# Altium footprint library Module.PcbLib: 20 footprints (part 1 of 2)
Each footprint in its own frame and in the unit in brackets; x right, y up, seen from the top. Pads: shape width x height; smd on the part's side, far side on the other; paste and mask are expansions set on the pad; w line width, h text height; cw(c..) or ccw(c..) is an arc to the next point about the centre after c.
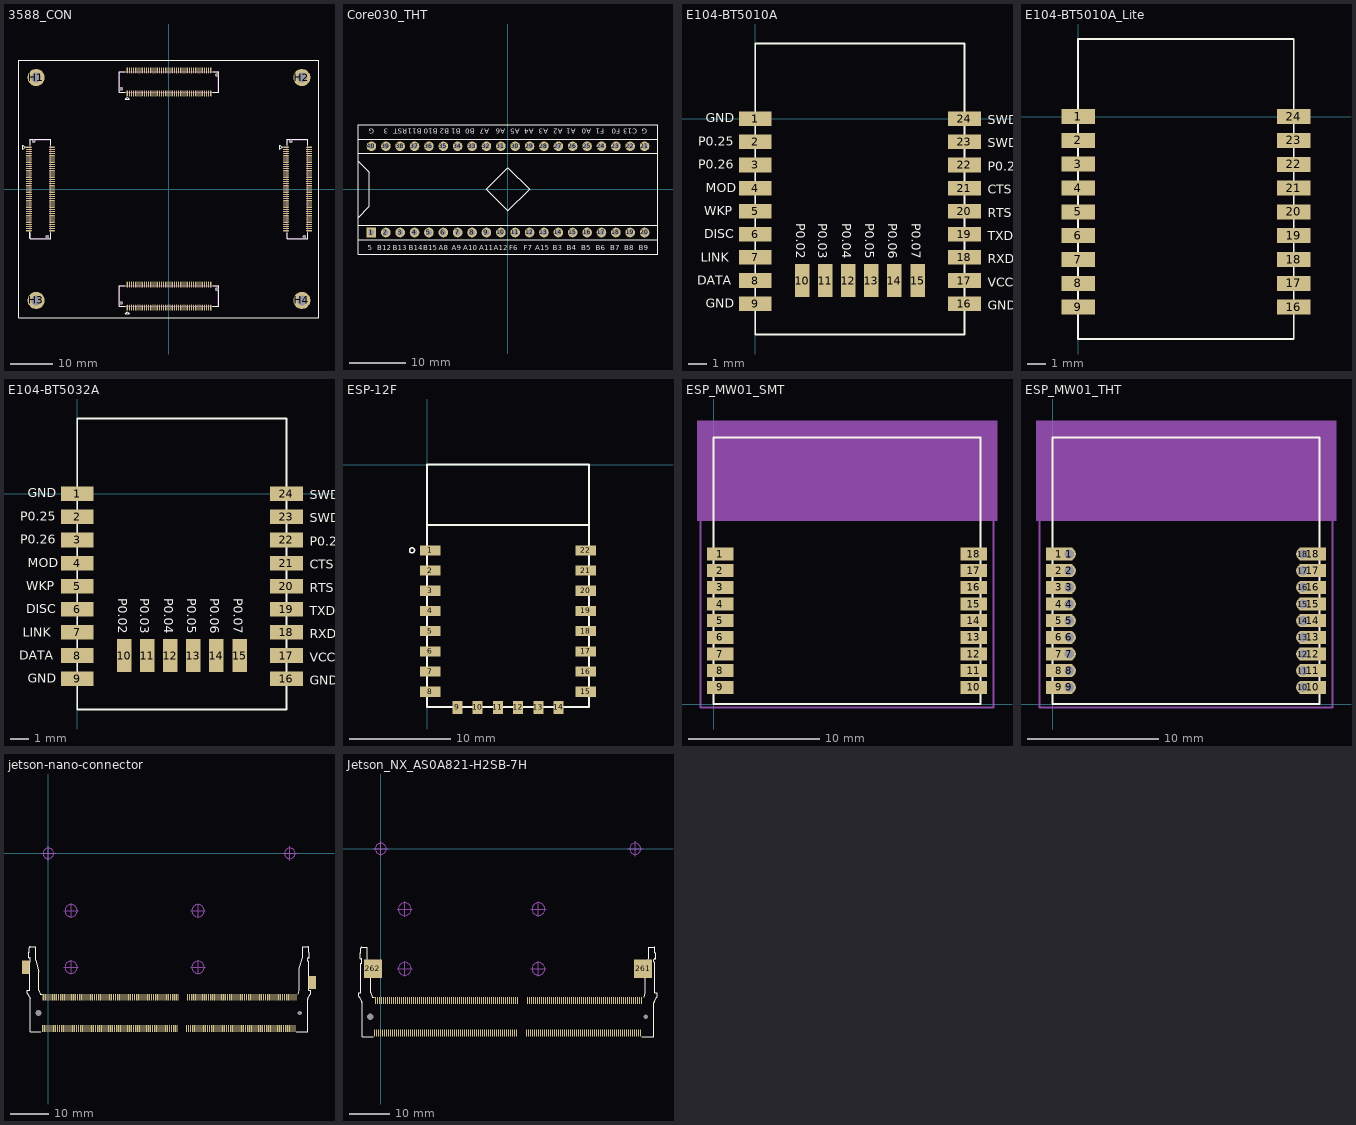
[diagram p0: the footprints below, top view; thin cyan lines are the x and y axes]

## 3588_CON [mil] "3588_CON"
pads (332):
  oval 10x55 smd: D1(-383.86,-1090.55) D2(-383.86,-877.95) D3(-364.17,-1090.55) D4(-364.17,-877.95) D5(-344.49,-1090.55) D6(-344.49,-877.95) D7(-324.8,-1090.55) D8(-324.8,-877.95) D9(-305.12,-1090.55) D10(-305.12,-877.95) D11(-285.43,-1090.55) D12(-285.43,-877.95) D13(-265.75,-1090.55) D14(-265.75,-877.95) D15(-246.06,-1090.55) D16(-246.06,-877.95) D17(-226.38,-1090.55) D18(-226.38,-877.95) D19(-206.69,-1090.55) D20(-206.69,-877.95) D21(-187.01,-1090.55) D22(-187.01,-877.95) D23(-167.32,-1090.55) D24(-167.32,-877.95) D25(-147.64,-1090.55) D26(-147.64,-877.95) D27(-127.95,-1090.55) D28(-127.95,-877.95) D29(-108.27,-1090.55) D30(-108.27,-877.95) D31(-88.58,-1090.55) D32(-88.58,-877.95) D33(-68.9,-1090.55) D34(-68.9,-877.95) D35(-49.21,-1090.55) D36(-49.21,-877.95) D37(-29.53,-1090.55) D38(-29.53,-877.95) D39(-9.84,-1090.55) D40(-9.84,-877.95) D41(9.84,-1090.55) D42(9.84,-877.95) D43(29.53,-1090.55) D44(29.53,-877.95) D45(49.21,-1090.55) D46(49.21,-877.95) D47(68.9,-1090.55) D48(68.9,-877.95) D49(88.58,-1090.55) D50(88.58,-877.95) D51(108.27,-1090.55) D52(108.27,-877.95) D53(127.95,-1090.55) D54(127.95,-877.95) D55(147.64,-1090.55) D56(147.64,-877.95) D57(167.32,-1090.55) D58(167.32,-877.95) D59(187.01,-1090.55) D60(187.01,-877.95) D61(206.69,-1090.55) D62(206.69,-877.95) D63(226.38,-1090.55) D64(226.38,-877.95) D65(246.06,-1090.55) D66(246.06,-877.95) D67(265.75,-1090.55) D68(265.75,-877.95) D69(285.43,-1090.55) D70(285.43,-877.95) D71(305.12,-1090.55) D72(305.12,-877.95) D73(324.8,-1090.55) D74(324.8,-877.95) D75(344.49,-1090.55) D76(344.49,-877.95) D77(364.17,-1090.55) D78(364.17,-877.95) D79(383.86,-1090.55) D80(383.86,-877.95) U1(-383.86,877.95) U2(-383.86,1090.55) U3(-364.17,877.95) U4(-364.17,1090.55) U5(-344.49,877.95) U6(-344.49,1090.55) U7(-324.8,877.95) U8(-324.8,1090.55) U9(-305.12,877.95) U10(-305.12,1090.55) U11(-285.43,877.95) U12(-285.43,1090.55) U13(-265.75,877.95) U14(-265.75,1090.55) U15(-246.06,877.95) U16(-246.06,1090.55) U17(-226.38,877.95) U18(-226.38,1090.55) U19(-206.69,877.95) U20(-206.69,1090.55) U21(-187.01,877.95) U22(-187.01,1090.55) U23(-167.32,877.95) U24(-167.32,1090.55) U25(-147.64,877.95) U26(-147.64,1090.55) U27(-127.95,877.95) U28(-127.95,1090.55) U29(-108.27,877.95) U30(-108.27,1090.55) U31(-88.58,877.95) U32(-88.58,1090.55) U33(-68.9,877.95) U34(-68.9,1090.55) U35(-49.21,877.95) U36(-49.21,1090.55) U37(-29.53,877.95) U38(-29.53,1090.55) U39(-9.84,877.95) U40(-9.84,1090.55) U41(9.84,877.95) U42(9.84,1090.55) U43(29.53,877.95) U44(29.53,1090.55) U45(49.21,877.95) U46(49.21,1090.55) U47(68.9,877.95) U48(68.9,1090.55) U49(88.58,877.95) U50(88.58,1090.55) U51(108.27,877.95) U52(108.27,1090.55) U53(127.95,877.95) U54(127.95,1090.55) U55(147.64,877.95) U56(147.64,1090.55) U57(167.32,877.95) U58(167.32,1090.55) U59(187.01,877.95) U60(187.01,1090.55) U61(206.69,877.95) U62(206.69,1090.55) U63(226.38,877.95) U64(226.38,1090.55) U65(246.06,877.95) U66(246.06,1090.55) U67(265.75,877.95) U68(265.75,1090.55) U69(285.43,877.95) U70(285.43,1090.55) U71(305.12,877.95) U72(305.12,1090.55) U73(324.8,877.95) U74(324.8,1090.55) U75(344.49,877.95) U76(344.49,1090.55) U77(364.17,877.95) U78(364.17,1090.55) U79(383.86,877.95) U80(383.86,1090.55)
  round 157.48 hole 90.55: H1(-1220.48,1023.62) H2(1220.48,1023.62) H3(-1220.48,-1023.62) H4(1220.48,-1023.62)
  oval 55x10 smd: L1(-1287.4,383.86) L2(-1074.8,383.86) L3(-1287.4,364.17) L4(-1074.8,364.17) L5(-1287.4,344.49) L6(-1074.8,344.49) L7(-1287.4,324.8) L8(-1074.8,324.8) L9(-1287.4,305.12) L10(-1074.8,305.12) L11(-1287.4,285.43) L12(-1074.8,285.43) L13(-1287.4,265.75) L14(-1074.8,265.75) L15(-1287.4,246.06) L16(-1074.8,246.06) L17(-1287.4,226.38) L18(-1074.8,226.38) L19(-1287.4,206.69) L20(-1074.8,206.69) L21(-1287.4,187.01) L22(-1074.8,187.01) L23(-1287.4,167.32) L24(-1074.8,167.32) L25(-1287.4,147.64) L26(-1074.8,147.64) L27(-1287.4,127.95) L28(-1074.8,127.95) L29(-1287.4,108.27) L30(-1074.8,108.27) L31(-1287.4,88.58) L32(-1074.8,88.58) L33(-1287.4,68.9) L34(-1074.8,68.9) L35(-1287.4,49.21) L36(-1074.8,49.21) L37(-1287.4,29.53) L38(-1074.8,29.53) L39(-1287.4,9.84) L40(-1074.8,9.84) L41(-1287.4,-9.84) L42(-1074.8,-9.84) L43(-1287.4,-29.53) L44(-1074.8,-29.53) L45(-1287.4,-49.21) L46(-1074.8,-49.21) L47(-1287.4,-68.9) L48(-1074.8,-68.9) L49(-1287.4,-88.58) L50(-1074.8,-88.58) L51(-1287.4,-108.27) L52(-1074.8,-108.27) L53(-1287.4,-127.95) L54(-1074.8,-127.95) L55(-1287.4,-147.64) L56(-1074.8,-147.64) L57(-1287.4,-167.32) L58(-1074.8,-167.32) L59(-1287.4,-187.01) L60(-1074.8,-187.01) L61(-1287.4,-206.69) L62(-1074.8,-206.69) L63(-1287.4,-226.38) L64(-1074.8,-226.38) L65(-1287.4,-246.06) L66(-1074.8,-246.06) L67(-1287.4,-265.75) L68(-1074.8,-265.75) L69(-1287.4,-285.43) L70(-1074.8,-285.43) L71(-1287.4,-305.12) L72(-1074.8,-305.12) L73(-1287.4,-324.8) L74(-1074.8,-324.8) L75(-1287.4,-344.49) L76(-1074.8,-344.49) L77(-1287.4,-364.17) L78(-1074.8,-364.17) L79(-1287.4,-383.86) L80(-1074.8,-383.86) R1(1074.8,383.86) R2(1287.4,383.86) R3(1074.8,364.17) R4(1287.4,364.17) R5(1074.8,344.49) R6(1287.4,344.49) R7(1074.8,324.8) R8(1287.4,324.8) R9(1074.8,305.12) R10(1287.4,305.12) R11(1074.8,285.43) R12(1287.4,285.43) R13(1074.8,265.75) R14(1287.4,265.75) R15(1074.8,246.06) R16(1287.4,246.06) R17(1074.8,226.38) R18(1287.4,226.38) R19(1074.8,206.69) R20(1287.4,206.69) R21(1074.8,187.01) R22(1287.4,187.01) R23(1074.8,167.32) R24(1287.4,167.32) R25(1074.8,147.64) R26(1287.4,147.64) R27(1074.8,127.95) R28(1287.4,127.95) R29(1074.8,108.27) R30(1287.4,108.27) R31(1074.8,88.58) R32(1287.4,88.58) R33(1074.8,68.9) R34(1287.4,68.9) R35(1074.8,49.21) R36(1287.4,49.21) R37(1074.8,29.53) R38(1287.4,29.53) R39(1074.8,9.84) R40(1287.4,9.84) R41(1074.8,-9.84) R42(1287.4,-9.84) R43(1074.8,-29.53) R44(1287.4,-29.53) R45(1074.8,-49.21) R46(1287.4,-49.21) R47(1074.8,-68.9) R48(1287.4,-68.9) R49(1074.8,-88.58) R50(1287.4,-88.58) R51(1074.8,-108.27) R52(1287.4,-108.27) R53(1074.8,-127.95) R54(1287.4,-127.95) R55(1074.8,-147.64) R56(1287.4,-147.64) R57(1074.8,-167.32) R58(1287.4,-167.32) R59(1074.8,-187.01) R60(1287.4,-187.01) R61(1074.8,-206.69) R62(1287.4,-206.69) R63(1074.8,-226.38) R64(1287.4,-226.38) R65(1074.8,-246.06) R66(1287.4,-246.06) R67(1074.8,-265.75) R68(1287.4,-265.75) R69(1074.8,-285.43) R70(1287.4,-285.43) R71(1074.8,-305.12) R72(1287.4,-305.12) R73(1074.8,-324.8) R74(1287.4,-324.8) R75(1074.8,-344.49) R76(1287.4,-344.49) R77(1074.8,-364.17) R78(1287.4,-364.17) R79(1074.8,-383.86) R80(1287.4,-383.86)
  round 32 hole 32 unplated: ""(-1244.09,437.01) ""(-1118.11,-437.01) ""(-437.01,-1047.24) ""(-437.01,921.26) ""(437.01,-921.26) ""(437.01,1047.24) ""(1118.11,437.01) ""(1244.1,-437.01)
Top Overlay:
  lines w6: -1278.34,-450 -1278.34,-395 ; -1276.1,-400 -1276.1,-455 -1086.1,-455 -1086.1,-400 ; -1276.1,400 -1276.1,455 -1086.1,455 -1086.1,400 ; -400,-1079.25 -455,-1079.25 -455,-889.25 -400,-889.25 ; -400,889.25 -455,889.25 -455,1079.25 -400,1079.25 ; 400,-1079.25 455,-1079.25 455,-889.25 400,-889.25 ; 400,889.25 455,889.25 455,1079.25 400,1079.25 ; 1086.1,-400 1086.1,-455 1276.1,-455 1276.1,-400 ; 1086.1,400 1086.1,455 1276.1,455 1276.1,400 ; -1377.95,-1181.1 1377.95,-1181.1 1377.95,1181.1 -1377.95,1181.1 -1377.95,-1181.1 ; -1342.57,363.61 -1342.57,403.61 -1322.57,383.61 -1342.57,363.61 ; -403.61,-1145.72 -383.61,-1125.72 -363.61,-1145.72 -403.61,-1145.72 ; -403.61,822.78 -383.61,842.78 -363.61,822.78 -403.61,822.78 ; 1019.63,363.61 1019.63,403.61 1039.63,383.61 1019.63,363.61
Mechanical 19:
  text "L29" at -1347.4,58.27 h25
  text "U29" at -118.27,877.95 h25
  text "L23" at -1347.4,117.32 h25
  text "L19" at -1347.4,156.69 h25
  text "L35" at -1347.4,-0.79 h25
  text "L21" at -1347.4,137.01 h25
  text "L25" at -1347.4,97.64 h25
  text "L37" at -1347.4,-20.47 h25
  text "L11" at -1347.4,235.43 h25
  text "L39" at -1347.4,-40.16 h25
  text "L9" at -1327.4,255.12 h25
  text "L33" at -1347.4,18.9 h25
  text "L7" at -1327.4,274.8 h25
  text "L5" at -1327.4,294.49 h25
  text "U73" at 314.8,877.95 h25
  text "R2" at 1247.4,333.86 h25
  text "L70" at -1134.8,-335.43 h25
  text "L74" at -1134.8,-374.8 h25
  text "U79" at 373.86,877.95 h25
  text "U27" at -137.95,877.95 h25
  text "L50" at -1134.8,-138.58 h25
  text "L48" at -1134.8,-118.9 h25
  text "D64" at 218.24,-879.7 h25
  text "D66" at 237.92,-879.7 h25
  text "D78" at 356.03,-879.7 h25
  text "U77" at 354.17,877.95 h25
  text "R71" at 1014.8,-355.12 h25
  text "R73" at 1014.8,-374.8 h25
  text "R65" at 1014.8,-296.06 h25
  text "R63" at 1014.8,-276.38 h25
  text "R61" at 1014.8,-256.69 h25
  text "R59" at 1014.8,-237.01 h25
  text "L72" at -1134.8,-355.12 h25
  text "U5" at -334.49,877.95 h25
  text "D38" at -37.67,-879.7 h25
  text "L14" at -1134.8,215.75 h25
  text "L2" at -1114.8,333.86 h25
  text "L4" at -1114.8,314.17 h25
  text "L34" at -1134.8,18.9 h25
  text "U6" at -334.49,1090.55 h25
  text "U18" at -236.38,1090.55 h25
  text "L40" at -1134.8,-40.16 h25
  text "U11" at -295.43,877.95 h25
  text "L38" at -1134.8,-20.47 h25
  text "U8" at -314.8,1090.55 h25
  text "U20" at -216.69,1090.55 h25
  text "L20" at -1134.8,156.69 h25
  text "L44" at -1134.8,-79.53 h25
  text "U9" at -295.12,877.95 h25
  text "L12" at -1134.8,235.43 h25
  text "U16" at -256.06,1090.55 h25
  text "U19" at -216.69,877.95 h25
  text "D68" at 257.61,-879.7 h25
  text "L26" at -1134.8,97.64 h25
  text "R76" at 1227.4,-394.49 h25
  text "L8" at -1114.8,274.8 h25
  text "R47" at 1014.8,-118.9 h25
  text "D48" at 60.76,-879.7 h25
  text "R9" at 1034.8,255.12 h25
  text "L28" at -1134.8,77.95 h25
  text "R43" at 1014.8,-79.53 h25
  text "L18" at -1134.8,176.38 h25
  text "L36" at -1134.8,-0.79 h25
  text "U1" at -373.86,877.95 h25
  text "U52" at 98.27,1090.55 h25
  text "R78" at 1227.4,-414.17 h25
  text "U62" at 196.69,1090.55 h25
  text "D22" at -195.15,-879.7 h25
  text "D24" at -175.46,-879.7 h25
  text "U15" at -256.06,877.95 h25
  text "U37" at -39.53,877.95 h25
  text "D20" at -214.83,-879.7 h25
  text "L80" at -1134.8,-433.86 h25
  text "U58" at 157.32,1090.55 h25
  text "D42" at 1.7,-879.7 h25
  text "L76" at -1134.8,-394.49 h25
  text "U66" at 236.06,1090.55 h25
  text "L22" at -1134.8,137.01 h25
  text "D26" at -155.78,-879.7 h25
  text "L3" at -1327.4,314.17 h25
  text "R49" at 1014.8,-138.58 h25
  text "R57" at 1014.8,-217.32 h25
  text "R77" at 1014.8,-414.17 h25
  text "R51" at 1014.8,-158.27 h25
  text "R11" at 1014.8,235.43 h25
  text "L15" at -1347.4,196.06 h25
  text "R55" at 1014.8,-197.64 h25
  text "U50" at 78.58,1090.55 h25
  text "L17" at -1347.4,176.38 h25
  text "R53" at 1014.8,-177.95 h25
  text "D72" at 296.98,-879.7 h25
  text "U60" at 177.01,1090.55 h25
  text "U3" at -354.17,877.95 h25
  text "U35" at -59.21,877.95 h25
  text "U56" at 137.64,1090.55 h25
  text "L6" at -1114.8,294.49 h25
  text "U72" at 295.12,1090.55 h25
  text "U14" at -275.75,1090.55 h25
  text "U10" at -315.12,1090.55 h25
  text "L32" at -1134.8,38.58 h25
  text "U78" at 354.17,1090.55 h25
  text "U71" at 295.12,877.95 h25
  text "U13" at -275.75,877.95 h25
  text "U63" at 216.38,877.95 h25
  text "R1" at 1034.8,333.86 h25
  text "U68" at 255.75,1090.55 h25
  text "D18" at -234.52,-879.7 h25
  text "U80" at 373.86,1090.55 h25
  text "L42" at -1134.8,-59.84 h25
  text "R32" at 1227.4,38.58 h25
  text "R69" at 1014.8,-335.43 h25
  text "U7" at -314.8,877.95 h25
  text "R13" at 1014.8,215.75 h25
  text "R79" at 1014.8,-433.86 h25
  text "L30" at -1134.8,58.27 h25
  text "U70" at 275.43,1090.55 h25
  text "U22" at -197.01,1090.55 h25
  text "R7" at 1034.8,274.8 h25
  text "L16" at -1134.8,196.06 h25
  text "U17" at -236.38,877.95 h25
  text "D28" at -136.09,-879.7 h25
  text "R67" at 1014.8,-315.75 h25
  text "D40" at -17.98,-879.7 h25
  text "R70" at 1227.4,-335.43 h25
  text "R72" at 1227.4,-355.12 h25
  text "D36" at -57.35,-879.7 h25
  text "L68" at -1134.8,-315.75 h25
  text "R44" at 1227.4,-79.53 h25
  text "R5" at 1034.8,294.49 h25
  text "R42" at 1227.4,-59.84 h25
  text "R46" at 1227.4,-99.21 h25
  text "R48" at 1227.4,-118.9 h25
  text "R34" at 1227.4,18.9 h25
  text "R58" at 1227.4,-217.32 h25
  text "R56" at 1227.4,-197.64 h25
  text "R62" at 1227.4,-256.69 h25
  text "R60" at 1227.4,-237.01 h25
  text "U4" at -354.17,1090.55 h25
  text "R54" at 1227.4,-177.95 h25
  text "R41" at 1014.8,-59.84 h25
  text "R52" at 1227.4,-158.27 h25
  text "D56" at 139.5,-879.7 h25
  text "R80" at 1227.4,-433.86 h25
  text "D58" at 159.18,-879.7 h25
  text "U76" at 334.49,1090.55 h25
  text "D61" at 174.94,-1104.76 h25
  text "D47" at 37.15,-1104.76 h25
  text "U67" at 255.75,877.95 h25
  text "D39" at -41.59,-1104.76 h25
  text "R38" at 1227.4,-20.47 h25
  text "R35" at 1014.8,-0.79 h25
  text "L66" at -1134.8,-296.06 h25
  text "D55" at 115.89,-1104.76 h25
  text "D49" at 56.83,-1104.76 h25
  text "D31" at -120.33,-1104.76 h25
  text "R4" at 1247.4,314.17 h25
  text "R33" at 1014.8,18.9 h25
  text "R31" at 1014.8,38.58 h25
  text "R3" at 1034.8,314.17 h25
  text "R19" at 1014.8,156.69 h25
  text "D19" at -238.44,-1104.76 h25
  text "D76" at 336.35,-879.7 h25
  text "D60" at 178.87,-879.7 h25
  text "U12" at -295.43,1090.55 h25
  text "D29" at -140.02,-1104.76 h25
  text "R17" at 1014.8,176.38 h25
  text "D52" at 100.13,-879.7 h25
  text "R23" at 1014.8,117.32 h25
  text "D74" at 316.66,-879.7 h25
  text "D35" at -80.96,-1104.76 h25
  text "R21" at 1014.8,137.01 h25
  text "D9" at -316.87,-1104.76 h25
  text "R27" at 1014.8,77.95 h25
  text "U69" at 275.43,877.95 h25
  text "D41" at -21.91,-1104.76 h25
  text "R6" at 1247.4,294.49 h25
  text "R25" at 1014.8,97.64 h25
  text "U75" at 334.49,877.95 h25
  text "D16" at -254.2,-879.7 h25
  text "D34" at -77.04,-879.7 h25
  text "D5" at -356.24,-1104.76 h25
  text "D15" at -277.81,-1104.76 h25
  text "D13" at -297.5,-1104.76 h25
  text "U74" at 314.8,1090.55 h25
  text "D21" at -218.76,-1104.76 h25
  text "R37" at 1014.8,-20.47 h25
  text "D4" at -374.17,-878.39 h25
  text "D27" at -159.7,-1104.76 h25
  text "R36" at 1227.4,-0.79 h25
  text "D43" at -2.22,-1104.76 h25
  text "D44" at 21.39,-879.7 h25
  text "D7" at -336.55,-1104.76 h25
  text "D14" at -273.89,-879.7 h25
  text "D59" at 155.26,-1104.76 h25
  text "D10" at -313.26,-879.7 h25
  text "D11" at -317.18,-1104.76 h25
  text "D8" at -336.11,-878.17 h25
  text "D33" at -100.65,-1104.76 h25
  text "D37" at -61.28,-1104.76 h25
  text "U48" at 58.9,1090.55 h25
  text "D25" at -179.39,-1104.76 h25
  text "D2" at -394.46,-878.61 h25
  text "R39" at 1014.8,-40.16 h25
  text "D12" at -293.57,-879.7 h25
  text "D3" at -375.92,-1104.76 h25
  text "R40" at 1227.4,-40.16 h25
  text "D17" at -258.13,-1104.76 h25
  text "D62" at 198.55,-879.7 h25
  text "L53" at -1347.4,-177.95 h25
  text "U25" at -157.64,877.95 h25
  text "U54" at 117.95,1090.55 h25
  text "R26" at 1227.4,97.64 h25
  text "U31" at -98.58,877.95 h25
  text "R22" at 1227.4,137.01 h25
  text "U33" at -78.9,877.95 h25
  text "R10" at 1227.4,255.12 h25
  text "R18" at 1227.4,176.38 h25
  text "R14" at 1227.4,215.75 h25
  text "R12" at 1227.4,235.43 h25
  text "R16" at 1227.4,196.06 h25
  text "L78" at -1134.8,-414.17 h25
  text "R24" at 1227.4,117.32 h25
  text "R28" at 1227.4,77.95 h25
  text "R20" at 1227.4,156.69 h25
  text "U43" at 19.53,877.95 h25
  text "U41" at -0.16,877.95 h25
  text "U47" at 58.9,877.95 h25
  text "U45" at 39.21,877.95 h25
  text "U57" at 157.32,877.95 h25
  text "L58" at -1134.8,-217.32 h25
  text "U55" at 137.64,877.95 h25
  text "L49" at -1347.4,-138.58 h25
  text "L56" at -1134.8,-197.64 h25
  text "U61" at 196.69,877.95 h25
  text "L51" at -1347.4,-158.27 h25
  text "D32" at -96.72,-879.7 h25
  text "L54" at -1134.8,-177.95 h25
  text "U59" at 177.01,877.95 h25
  text "L47" at -1347.4,-118.9 h25
  text "L52" at -1134.8,-158.27 h25
  text "U51" at 98.27,877.95 h25
  text "L55" at -1347.4,-197.64 h25
  text "U49" at 78.58,877.95 h25
  text "L61" at -1347.4,-256.69 h25
  text "U44" at 19.53,1090.55 h25
  text "L63" at -1347.4,-276.38 h25
  text "U42" at -0.16,1090.55 h25
  text "L69" at -1347.4,-335.43 h25
  text "U40" at -19.84,1090.55 h25
  text "L77" at -1347.4,-414.17 h25
  text "U38" at -39.53,1090.55 h25
  text "L79" at -1347.4,-433.86 h25
  text "U32" at -98.58,1090.55 h25
  text "L45" at -1347.4,-99.21 h25
  text "U30" at -118.27,1090.55 h25
  text "L71" at -1347.4,-355.12 h25
  text "U28" at -137.95,1090.55 h25
  text "L65" at -1347.4,-296.06 h25
  text "U26" at -157.64,1090.55 h25
  text "L73" at -1347.4,-374.8 h25
  text "U36" at -59.21,1090.55 h25
  text "L75" at -1347.4,-394.49 h25
  text "U23" at -177.32,877.95 h25
  text "U34" at -78.9,1090.55 h25
  text "L57" at -1347.4,-217.32 h25
  text "L59" at -1347.4,-237.01 h25
  text "D70" at 277.29,-879.7 h25
  text "D79" at 352.11,-1104.76 h25
  text "D77" at 332.42,-1104.76 h25
  text "D75" at 312.74,-1104.76 h25
  text "D73" at 293.05,-1104.76 h25
  text "D71" at 273.37,-1104.76 h25
  text "D53" at 96.2,-1104.76 h25
  text "D51" at 76.52,-1104.76 h25
  text "D57" at 135.57,-1104.76 h25
  text "L27" at -1347.4,77.95 h25
  text "R75" at 1014.8,-394.49 h25
  text "L41" at -1347.4,-59.84 h25
  text "D50" at 80.44,-879.7 h25
  text "L31" at -1347.4,38.58 h25
  text "L64" at -1134.8,-276.38 h25
  text "L62" at -1134.8,-256.69 h25
  text "R66" at 1227.4,-296.06 h25
  text "R68" at 1227.4,-315.75 h25
  text "D46" at 41.07,-879.7 h25
  text "R74" at 1227.4,-374.8 h25
  text "R29" at 1014.8,58.27 h25
  text "L10" at -1134.8,255.12 h25
  text "L43" at -1347.4,-79.53 h25
  text "U65" at 236.06,877.95 h25
  text "U64" at 216.38,1090.55 h25
  text "H4" at 1130.48,-1023.62 h25
  text "L60" at -1134.8,-237.01 h25
  text "H2" at 1130.48,1023.62 h25
  text "H1" at -1310.48,1023.62 h25
  text "L1" at -1327.4,333.86 h25
  text "L67" at -1347.4,-315.75 h25
  text "H3" at -1310.48,-1023.62 h25
  text "U46" at 39.21,1090.55 h25
  text "U24" at -177.32,1090.55 h25
  text "U2" at -373.86,1090.55 h25
  text "U53" at 117.95,877.95 h25
  text "U21" at -197.01,877.95 h25
  text "U39" at -19.84,877.95 h25
  text "R8" at 1247.4,274.8 h25
  text "R15" at 1014.8,196.06 h25
  text "R30" at 1227.4,58.27 h25
  text "L13" at -1347.4,215.75 h25
  text "L24" at -1134.8,117.32 h25
  text "R45" at 1014.8,-99.21 h25
  text "R50" at 1227.4,-138.58 h25
  text "R64" at 1227.4,-276.38 h25
  text "L46" at -1134.8,-99.21 h25
  text "D80" at 375.72,-879.7 h25
  text "D54" at 119.81,-879.7 h25
  text "D30" at -116.41,-879.7 h25
  text "D6" at -354.93,-878.39 h25
  text "D45" at 17.46,-1104.76 h25
  text "D63" at 194.63,-1104.76 h25
  text "D65" at 214.31,-1104.76 h25
  text "D67" at 234,-1104.76 h25
  text "D69" at 253.68,-1104.76 h25
  text "D23" at -199.07,-1104.76 h25
  text "D1" at -325.61,-1104.76 h25
Mechanical 20:
  lines w6: -1275.59,-452.76 -1086.61,-452.76 -1086.61,452.76 -1275.59,452.76 -1275.59,-452.76 ; -452.76,-1078.74 452.76,-1078.74 452.76,-889.76 -452.76,-889.76 -452.76,-1078.74 ; -452.76,889.76 452.76,889.76 452.76,1078.74 -452.76,1078.74 -452.76,889.76 ; 1086.62,-452.76 1275.59,-452.76 1275.59,452.76 1086.62,452.76 1086.62,-452.76
  text ".Designator" at -12.85,-89.4 h35

## Core030_THT [mm]
pads (40):
  rect 1.7x1.7 hole 1: 1(-24.13,-7.62)
  round 1.7 hole 1: 2(-21.59,-7.62) 3(-19.05,-7.62) 4(-16.51,-7.62) 5(-13.97,-7.62) 6(-11.43,-7.62) 7(-8.89,-7.62) 8(-6.35,-7.62) 9(-3.81,-7.62) 10(-1.27,-7.62) 11(1.27,-7.62) 12(3.81,-7.62) 13(6.35,-7.62) 14(8.89,-7.62) 15(11.43,-7.62) 16(13.97,-7.62) 17(16.51,-7.62) 18(19.05,-7.62) 19(21.59,-7.62) 20(24.13,-7.62) 21(24.13,7.62) 22(21.59,7.62) 23(19.05,7.62) 24(16.51,7.62) 25(13.97,7.62) 26(11.43,7.62) 27(8.89,7.62) 28(6.35,7.62) 29(3.81,7.62) 30(1.27,7.62) 31(-1.27,7.62) 32(-3.81,7.62) 33(-6.35,7.62) 34(-8.89,7.62) 35(-11.43,7.62) 36(-13.97,7.62) 37(-16.51,7.62) 38(-19.05,7.62) 39(-21.59,7.62) 40(-24.13,7.62)
Top Overlay:
  lines w0.2: -26.5,-8.89 26.5,-8.89 ; -26.5,-6.35 26.5,-6.35 ; -26.5,-5 -24.5,-3 -24.5,3 -26.5,5 ; -26.5,6.35 26.5,6.35 ; -26.5,8.89 26.5,8.89 ; -26.5,-11.43 -26.5,11.43 26.5,11.43 26.5,-11.43 -26.5,-11.43 ; -3.81,0 0,-3.81 3.81,0 0,3.81 -3.81,0
  text "B0" at -5.842,10.668 h0.89
  text "A2" at 9.652,10.668 h0.89
  text "3" at -21.115,10.668 h0.89
  text "A7" at -3.302,10.668 h0.89
  text "B10" at -12.446,10.668 h0.89
  text "F0" at 19.812,10.668 h0.89
  text "B11" at -15.24,10.668 h0.89
  text "A5" at 2.032,10.668 h0.89
  text "A4" at 4.572,10.668 h0.89
  text "B1" at -8.382,10.668 h0.89
  text "A1" at 11.938,10.668 h0.89
  text "C13" at 22.86,10.668 h0.89
  text "RST" at -17.78,10.668 h0.89
  text "G" at 24.638,10.668 h0.89
  text "B2" at -10.414,10.668 h0.89
  text "F1" at 17.018,10.668 h0.89
  text "A6" at -0.508,10.668 h0.89
  text "A0" at 14.732,10.668 h0.89
  text "A3" at 7.112,10.668 h0.89
  text "G" at -23.622,10.668 h0.89
  text "B7" at 18.034,-10.795 h0.89
  text "5" at -24.765,-10.795 h0.89
  text "B6" at 15.494,-10.795 h0.89
  text "A11" at -5.08,-10.795 h0.89
  text "B9" at 23.114,-10.795 h0.89
  text "A9" at -9.906,-10.795 h0.89
  text "B3" at 7.874,-10.795 h0.89
  text "B8" at 20.574,-10.795 h0.89
  text "B5" at 12.954,-10.795 h0.89
  text "B13" at -20.32,-10.795 h0.89
  text "B14" at -17.526,-10.795 h0.89
  text "A10" at -7.874,-10.795 h0.89
  text "B15" at -14.986,-10.795 h0.89
  text "A12" at -2.54,-10.795 h0.89
  text "A8" at -12.192,-10.795 h0.89
  text "B4" at 10.414,-10.795 h0.89
  text "A15" at 4.826,-10.795 h0.89
  text "F6" at 0.254,-10.795 h0.89
  text "F7" at 2.794,-10.795 h0.89
  text "B12" at -23.114,-10.795 h0.89

## E104-BT5010A [mm]
pads (24):
  rect 1.8x0.8 smd: 1(0,0) 2(0,-1.27) 3(0,-2.54) 4(0,-3.81) 5(0,-5.08) 6(0,-6.35) 7(0,-7.62) 8(0,-8.89) 9(0,-10.16) 16(11.5,-10.16) 17(11.5,-8.89) 18(11.5,-7.62) 19(11.5,-6.35) 20(11.5,-5.08) 21(11.5,-3.81) 22(11.5,-2.54) 23(11.5,-1.27) 24(11.5,0)
  rect 0.8x1.8 smd: 10(2.575,-8.89) 11(3.845,-8.89) 12(5.115,-8.89) 13(6.385,-8.89) 14(7.655,-8.89) 15(8.925,-8.89)
Top Overlay:
  lines w0.1: 0,-11.86 11.5,-11.86 11.5,4.14 0,4.14 0,-11.86
  text "GND" at -2.709,-0.2 h0.5
  text "P0.25" at -3.137,-1.475 h0.5
  text "P0.26" at -3.137,-2.75 h0.5
  text "MOD" at -2.709,-4.025 h0.5
  text "WKP" at -2.812,-5.3 h0.5
  text "DISC" at -2.806,-6.575 h0.5
  text "LINK" at -2.997,-7.85 h0.5
  text "DATA" at -3.2,-9.125 h0.5
  text "VCC" at 12.791,-9.225 h0.5
  text "RXD" at 12.791,-7.95 h0.5
  text "TXD" at 12.791,-6.675 h0.5
  text "RTS" at 12.791,-5.4 h0.5
  text "CTS" at 12.791,-4.125 h0.5
  text "P0.21/RST" at 12.791,-2.85 h0.5
  text "SWDCLK" at 12.791,-1.575 h0.5
  text "SWDIO" at 12.791,-0.3 h0.5
  text "P0.07" at 8.595,-5.737 h0.5
  text "P0.05" at 6.055,-5.737 h0.5
  text "P0.04" at 4.785,-5.737 h0.5
  text "P0.02" at 2.256,-5.737 h0.5
  text "P0.06" at 7.325,-5.737 h0.5
  text "P0.03" at 3.454,-5.737 h0.5
  text "GND" at -2.709,-10.4 h0.5
  text "GND" at 12.791,-10.5 h0.5

## E104-BT5010A_Lite [mm]
pads (18):
  rect 1.8x0.8 smd: 1(0,0) 2(0,-1.27) 3(0,-2.54) 4(0,-3.81) 5(0,-5.08) 6(0,-6.35) 7(0,-7.62) 8(0,-8.89) 9(0,-10.16) 16(11.5,-10.16) 17(11.5,-8.89) 18(11.5,-7.62) 19(11.5,-6.35) 20(11.5,-5.08) 21(11.5,-3.81) 22(11.5,-2.54) 23(11.5,-1.27) 24(11.5,0)
Top Overlay:
  lines w0.1: 0,-11.86 0,4.14 11.5,4.14 11.5,-11.86 0,-11.86
3D body: height 0.8, standoff 0, extent 0,-11.862 11.506,4.14
3D body: height 1.6, standoff 0.8, extent 0.711,-11.049 10.922,0.991

## E104-BT5032A [mm]
pads (24):
  rect 1.8x0.8 smd: 1(0,0) 2(0,-1.27) 3(0,-2.54) 4(0,-3.81) 5(0,-5.08) 6(0,-6.35) 7(0,-7.62) 8(0,-8.89) 9(0,-10.16) 16(11.5,-10.16) 17(11.5,-8.89) 18(11.5,-7.62) 19(11.5,-6.35) 20(11.5,-5.08) 21(11.5,-3.81) 22(11.5,-2.54) 23(11.5,-1.27) 24(11.5,0)
  rect 0.8x1.8 smd: 10(2.575,-8.89) 11(3.845,-8.89) 12(5.115,-8.89) 13(6.385,-8.89) 14(7.655,-8.89) 15(8.925,-8.89)
Top Overlay:
  lines w0.1: 0,-11.86 0,4.14 11.5,4.14 11.5,-11.86 0,-11.86
  text "GND" at 12.791,-10.5 h0.5
  text "GND" at -2.709,-10.4 h0.5
  text "P0.03" at 3.454,-5.737 h0.5
  text "P0.06" at 7.325,-5.737 h0.5
  text "P0.02" at 2.256,-5.737 h0.5
  text "P0.04" at 4.785,-5.737 h0.5
  text "P0.05" at 6.055,-5.737 h0.5
  text "P0.07" at 8.595,-5.737 h0.5
  text "SWDIO" at 12.791,-0.3 h0.5
  text "SWDCLK" at 12.791,-1.575 h0.5
  text "P0.21/RST" at 12.791,-2.85 h0.5
  text "CTS" at 12.791,-4.125 h0.5
  text "RTS" at 12.791,-5.4 h0.5
  text "TXD" at 12.791,-6.675 h0.5
  text "RXD" at 12.791,-7.95 h0.5
  text "VCC" at 12.791,-9.225 h0.5
  text "DATA" at -3.2,-9.125 h0.5
  text "LINK" at -2.997,-7.85 h0.5
  text "DISC" at -2.806,-6.575 h0.5
  text "WKP" at -2.812,-5.3 h0.5
  text "MOD" at -2.709,-4.025 h0.5
  text "P0.26" at -3.137,-2.75 h0.5
  text "P0.25" at -3.137,-1.475 h0.5
  text "GND" at -2.709,-0.2 h0.5

## ESP-12F [mm]
pads (22):
  rect 2x1 smd: 1(0.3,-8.5) 2(0.3,-10.5) 3(0.3,-12.5) 4(0.3,-14.5) 5(0.3,-16.5) 6(0.3,-18.5) 7(0.3,-20.5) 8(0.3,-22.5) 15(15.7,-22.5) 16(15.7,-20.5) 17(15.7,-18.5) 18(15.7,-16.5) 19(15.7,-14.5) 20(15.7,-12.5) 21(15.7,-10.5) 22(15.7,-8.5)
  rect 1x1.3 smd: 9(3,-24.05) 10(5,-24.05) 11(7,-24.05) 12(9,-24.05) 13(11,-24.05) 14(13,-24.05)
Top Overlay:
  circle w0.152: c-1.5,-8.5 r0.25
  lines w0.203: 0,-6 16,-6 ; 0,-24 16,-24 16,0 0,0 0,-24
Multi-Layer:
  pour cut-out: -5,-6 21,-6 21,5 -5,5

## ESP_MW01_SMT [mm]
pads (18):
  rect 2x1 smd: 1(0.508,11.43) 2(0.508,10.16) 3(0.508,8.89) 4(0.508,7.62) 5(0.508,6.35) 6(0.508,5.08) 7(0.508,3.81) 8(0.508,2.54) 9(0.508,1.27) 10(19.812,1.27) 11(19.812,2.54) 12(19.812,3.81) 13(19.812,5.08) 14(19.812,6.35) 15(19.812,7.62) 16(19.812,8.89) 17(19.812,10.16) 18(19.812,11.43)
Top Overlay:
  lines w0.152: 0,0 0,20.32 20.32,20.32 20.32,0 0,0
Mechanical 15:
  pour cut-out: -1.27,21.59 21.59,21.59 21.59,13.97 -1.27,13.97
  lines w0.152: -1.016,-0.254 21.336,-0.254 21.336,21.082 -1.016,21.082 -1.016,-0.254
3D body "ESP_MW01.step": height 2.45, standoff 0.2, extent 0,0 20.32,20.32

## ESP_MW01_THT [mm]
pads (36):
  rect 2x1 smd: 1(0.508,11.43) 2(0.508,10.16) 3(0.508,8.89) 4(0.508,7.62) 5(0.508,6.35) 6(0.508,5.08) 7(0.508,3.81) 8(0.508,2.54) 9(0.508,1.27) 10(19.812,1.27) 11(19.812,2.54) 12(19.812,3.81) 13(19.812,5.08) 14(19.812,6.35) 15(19.812,7.62) 16(19.812,8.89) 17(19.812,10.16) 18(19.812,11.43)
  round 1 hole 0.7: 1(1.27,11.43) 2(1.27,10.16) 3(1.27,8.89) 4(1.27,7.62) 5(1.27,6.35) 6(1.27,5.08) 7(1.27,3.81) 8(1.27,2.54) 9(1.27,1.27) 10(19.05,1.27) 11(19.05,2.54) 12(19.05,3.81) 13(19.05,5.08) 14(19.05,6.35) 15(19.05,7.62) 16(19.05,8.89) 17(19.05,10.16) 18(19.05,11.43)
Top Overlay:
  lines w0.152: 0,0 0,20.32 20.32,20.32 20.32,0 0,0
Mechanical 15:
  pour cut-out: -1.27,21.59 21.59,21.59 21.59,13.97 -1.27,13.97
  lines w0.152: -1.016,-0.254 21.336,-0.254 21.336,21.082 -1.016,21.082 -1.016,-0.254
3D body "PinHeader_1x09_P1.27mm_Vertical.step": height 16.3, standoff 10, extent 18,0.635 20.1,12.065
3D body "PinHeader_1x09_P1.27mm_Vertical.step": height 16.3, standoff 10, extent 0.22,0.635 2.32,12.065
3D body "ESP_MW01.step": height 16.45, standoff 14.2, extent 0,0 20.32,20.32
3D body "PinSocket_1x09_P1.27mm_Vertical.step": height 4.4, standoff -2.6, extent 0,0.635 2.54,12.065
3D body "PinSocket_1x09_P1.27mm_Vertical.step": height 4.4, standoff -2.6, extent 17.78,0.635 20.32,12.065

## jetson-nano-connector [mm]
pads (264):
  rect 0.3x1.75 smd paste-0.05: 1(-1.575,-46.1) 2(-1.325,-37.9) 3(-1.075,-46.1) 4(-0.825,-37.9) 5(-0.575,-46.1) 6(-0.325,-37.9) 7(-0.075,-46.1) 8(0.175,-37.9) 9(0.425,-46.1) 10(0.675,-37.9) 11(0.925,-46.1) 12(1.175,-37.9) 13(1.425,-46.1) 14(1.675,-37.9) 15(1.925,-46.1) 16(2.175,-37.9) 17(2.425,-46.1) 18(2.675,-37.9) 19(2.925,-46.1) 20(3.175,-37.9) 21(3.425,-46.1) 22(3.675,-37.9) 23(3.925,-46.1) 24(4.175,-37.9) 25(4.425,-46.1) 26(4.675,-37.9) 27(4.925,-46.1) 28(5.175,-37.9) 29(5.425,-46.1) 30(5.675,-37.9) 31(5.925,-46.1) 32(6.175,-37.9) 33(6.425,-46.1) 34(6.675,-37.9) 35(6.925,-46.1) 36(7.175,-37.9) 37(7.425,-46.1) 38(7.675,-37.9) 39(7.925,-46.1) 40(8.175,-37.9) 41(8.425,-46.1) 42(8.675,-37.9) 43(8.925,-46.1) 44(9.175,-37.9) 45(9.425,-46.1) 46(9.675,-37.9) 47(9.925,-46.1) 48(10.175,-37.9) 49(10.425,-46.1) 50(10.675,-37.9) 51(10.925,-46.1) 52(11.175,-37.9) 53(11.425,-46.1) 54(11.675,-37.9) 55(11.925,-46.1) 56(12.175,-37.9) 57(12.425,-46.1) 58(12.675,-37.9) 59(12.925,-46.1) 60(13.175,-37.9) 61(13.425,-46.1) 62(13.675,-37.9) 63(13.925,-46.1) 64(14.175,-37.9) 65(14.425,-46.1) 66(14.675,-37.9) 67(14.925,-46.1) 68(15.175,-37.9) 69(15.425,-46.1) 70(15.675,-37.9) 71(15.925,-46.1) 72(16.175,-37.9) 73(16.425,-46.1) 74(16.675,-37.9) 75(16.925,-46.1) 76(17.175,-37.9) 77(17.425,-46.1) 78(17.675,-37.9) 79(17.925,-46.1) 80(18.175,-37.9) 81(18.425,-46.1) 82(18.675,-37.9) 83(18.925,-46.1) 84(19.175,-37.9) 85(19.425,-46.1) 86(19.675,-37.9) 87(19.925,-46.1) 88(20.175,-37.9) 89(20.425,-46.1) 90(20.675,-37.9) 91(20.925,-46.1) 92(21.175,-37.9) 93(21.425,-46.1) 94(21.675,-37.9) 95(21.925,-46.1) 96(22.175,-37.9) 97(22.425,-46.1) 98(22.675,-37.9) 99(22.925,-46.1) 100(23.175,-37.9) 101(23.425,-46.1) 102(23.675,-37.9) 103(23.925,-46.1) 104(24.175,-37.9) 105(24.425,-46.1) 106(24.675,-37.9) 107(24.925,-46.1) 108(25.175,-37.9) 109(25.425,-46.1) 110(25.675,-37.9) 111(25.925,-46.1) 112(26.175,-37.9) 113(26.425,-46.1) 114(26.675,-37.9) 115(26.925,-46.1) 116(27.175,-37.9) 117(27.425,-46.1) 118(27.675,-37.9) 119(27.925,-46.1) 120(28.175,-37.9) 121(28.425,-46.1) 122(28.675,-37.9) 123(28.925,-46.1) 124(29.175,-37.9) 125(29.425,-46.1) 126(29.675,-37.9) 127(29.925,-46.1) 128(30.175,-37.9) 129(30.425,-46.1) 130(30.675,-37.9) 131(30.925,-46.1) 132(31.175,-37.9) 133(31.425,-46.1) 134(31.675,-37.9) 135(31.925,-46.1) 136(32.175,-37.9) 137(32.425,-46.1) 138(32.675,-37.9) 139(32.925,-46.1) 140(33.175,-37.9) 141(33.425,-46.1) 142(33.675,-37.9) 143(33.925,-46.1) 144(34.175,-37.9) 145(36.425,-46.1) 146(36.675,-37.9) 147(36.925,-46.1) 148(37.175,-37.9) 149(37.425,-46.1) 150(37.675,-37.9) 151(37.925,-46.1) 152(38.175,-37.9) 153(38.425,-46.1) 154(38.675,-37.9) 155(38.925,-46.1) 156(39.175,-37.9) 157(39.425,-46.1) 158(39.675,-37.9) 159(39.925,-46.1) 160(40.175,-37.9) 161(40.425,-46.1) 162(40.675,-37.9) 163(40.925,-46.1) 164(41.175,-37.9) 165(41.425,-46.1) 166(41.675,-37.9) 167(41.925,-46.1) 168(42.175,-37.9) 169(42.425,-46.1) 170(42.675,-37.9) 171(42.925,-46.1) 172(43.175,-37.9) 173(43.425,-46.1) 174(43.675,-37.9) 175(43.925,-46.1) 176(44.175,-37.9) 177(44.425,-46.1) 178(44.675,-37.9) 179(44.925,-46.1) 180(45.175,-37.9) 181(45.425,-46.1) 182(45.675,-37.9) 183(45.925,-46.1) 184(46.175,-37.9) 185(46.425,-46.1) 186(46.675,-37.9) 187(46.925,-46.1) 188(47.175,-37.9) 189(47.425,-46.1) 190(47.675,-37.9) 191(47.925,-46.1) 192(48.175,-37.9) 193(48.425,-46.1) 194(48.675,-37.9) 195(48.925,-46.1) 196(49.175,-37.9) 197(49.425,-46.1) 198(49.675,-37.9) 199(49.925,-46.1) 200(50.175,-37.9) 201(50.425,-46.1) 202(50.675,-37.9) 203(50.925,-46.1) 204(51.175,-37.9) 205(51.425,-46.1) 206(51.675,-37.9) 207(51.925,-46.1) 208(52.175,-37.9) 209(52.425,-46.1) 210(52.675,-37.9) 211(52.925,-46.1) 212(53.175,-37.9) 213(53.425,-46.1) 214(53.675,-37.9) 215(53.925,-46.1) 216(54.175,-37.9) 217(54.425,-46.1) 218(54.675,-37.9) 219(54.925,-46.1) 220(55.175,-37.9) 221(55.425,-46.1) 222(55.675,-37.9) 223(55.925,-46.1) 224(56.175,-37.9) 225(56.425,-46.1) 226(56.675,-37.9) 227(56.925,-46.1) 228(57.175,-37.9) 229(57.425,-46.1) 230(57.675,-37.9) 231(57.925,-46.1) 232(58.175,-37.9) 233(58.425,-46.1) 234(58.675,-37.9) 235(58.925,-46.1) 236(59.175,-37.9) 237(59.425,-46.1) 238(59.675,-37.9) 239(59.925,-46.1) 240(60.175,-37.9) 241(60.425,-46.1) 242(60.675,-37.9) 243(60.925,-46.1) 244(61.175,-37.9) 245(61.425,-46.1) 246(61.675,-37.9) 247(61.925,-46.1) 248(62.175,-37.9) 249(62.425,-46.1) 250(62.675,-37.9) 251(62.925,-46.1) 252(63.175,-37.9) 253(63.425,-46.1) 254(63.675,-37.9) 255(63.925,-46.1) 256(64.175,-37.9) 257(64.425,-46.1) 258(64.675,-37.9) 259(64.925,-46.1) 260(65.175,-37.9)
  rect 2x3.5 smd paste-0.05: 261(69.525,-34) 262(-5.975,-30)
  round 0 hole 1.6 unplated: M(-2.6,-42)
  round 0 hole 1.1 unplated: M(66.2,-42)
Top Overlay:
  lines w0.1: -4.954,-28.6 -4.954,-36 -5.5,-36.05 ; -4.878,-28.6 ccw(c-4.878,-28.45) -4.728,-28.45 -4.728,-27.667 ccw(c-4.878,-27.667) -4.878,-27.517 -5.127,-27.517 -5.127,-26.028 -4.978,-26.028 -4.978,-24.813 cw(c-4.778,-24.813) -4.778,-24.613 -3.871,-24.613 -3.871,-24.61 -3.371,-24.61 -3.371,-28.128 -2.5,-31.166 -2.5,-36.05 -2.15,-37.15 -1.65,-37.15 ; 65.85,-37.15 66.1,-36.05 ; -5.5,-36.813 ccw(c-5,-36.813) -5.43,-37.068 ; -5.5,-36.813 ccw(c-5,-36.813) -5.43,-37.068 ; -5.5,-36.813 -5.5,-36.05 ; -5.5,-36.813 -5.5,-36.05 ; -5.43,-37.068 -4.77,-38.182 ; -5.43,-37.068 -4.77,-38.182 ; -4.77,-38.182 cw(c-5.2,-38.437) -4.7,-38.437 ; -4.77,-38.182 cw(c-5.2,-38.437) -4.7,-38.437 ; -4.7,-47 -4.7,-38.437 ; -4.7,-47 -4.7,-38.437 ; -4.7,-47 -1.95,-47 -4.7,-47 ; 66.1,-36.05 66.1,-30.318 ; 66.1,-36.05 66.1,-30.318 ; 66.1,-30.318 66.98,-27.318 66.98,-24.595 67.59,-24.595 ccw(c67.63,-24.45) 67.63,-24.6 68.35,-24.6 cw(c68.35,-24.8) 68.55,-24.8 68.55,-26 68.736,-26 68.736,-27.5 68.5,-27.5 ccw(c68.5,-27.7) 68.3,-27.7 68.3,-28.3 ccw(c68.5,-28.3) 68.5,-28.5 68.545,-28.5 68.545,-36 69.1,-36.05 ; 68.3,-47 68.3,-38.437 ; 68.3,-47 65.3,-47 68.3,-47 ; 68.3,-47 68.3,-38.437 ; 68.3,-38.437 cw(c68.8,-38.437) 68.37,-38.182 ; 68.3,-38.437 cw(c68.8,-38.437) 68.37,-38.182 ; 68.37,-38.182 69.03,-37.068 ; 68.37,-38.182 69.03,-37.068 ; 69.03,-37.068 ccw(c68.6,-36.813) 69.1,-36.813 ; 69.03,-37.068 ccw(c68.6,-36.813) 69.1,-36.813 ; 69.1,-36.813 69.1,-36.05 ; 69.1,-36.813 69.1,-36.05
Mechanical 3:
  circle w0.1: c0,0 r1.375
  circle w0.1: c5.987,-30.002 r1.6
  circle w0.1: c5.987,-15.098 r1.6
  circle w0.1: c39.413,-15.098 r1.6
  circle w0.1: c39.413,-30.002 r1.6
  circle w0.1: c63.6,0 r1.375
  lines w0.1: -1.9,0 0,0 ; 0,-1.9 0,0 ; 0,1.9 0,0 ; 1.9,0 0,0 ; 4.094,-29.997 5.994,-29.997 ; 4.094,-15.088 5.994,-15.088 ; 5.994,-31.897 5.994,-29.997 ; 5.994,-28.097 5.994,-29.997 ; 5.994,-16.988 5.994,-15.088 ; 5.994,-13.188 5.994,-15.088 ; 7.894,-29.997 5.994,-29.997 ; 7.894,-15.088 5.994,-15.088 ; 37.521,-29.997 39.421,-29.997 ; 37.521,-15.113 39.421,-15.113 ; 39.421,-31.897 39.421,-29.997 ; 39.421,-28.097 39.421,-29.997 ; 39.421,-17.013 39.421,-15.113 ; 39.421,-13.213 39.421,-15.113 ; 41.321,-29.997 39.421,-29.997 ; 41.321,-15.113 39.421,-15.113 ; 61.702,0 63.602,0 ; 63.602,-1.9 63.602,0 ; 63.602,1.9 63.602,0 ; 65.502,0 63.602,0
  text "module mounting holes placement taken from 3D models" at 12.125,-0.125 h0.76
  text "its real position may differ" at 21.15,-1.2 h0.76
3D body "c-2309413-1-1-3d.stp": height 9.23, standoff -0.42, extent -6.275,-46.9 69.824,-21.05

## jetson-nano-module [mm]
height 13.55
3D body "n.step": height 10.73, standoff 5.48, extent -3,-42 66.6,3

## jetson-tx2-nx-module [mm]
height 13.55
3D body "P3636-ENVELOPE.stp": height 9.78, standoff 4.1, extent 0,-45 69.6,0

## Jetson_NX_AS0A821-H2SB-7H [mm]
pads (264):
  rect 0.3x1.75 smd paste-0.05: 1(-1.575,-46.1) 2(-1.325,-37.9) 3(-1.075,-46.1) 4(-0.825,-37.9) 5(-0.575,-46.1) 6(-0.325,-37.9) 7(-0.075,-46.1) 8(0.175,-37.9) 9(0.425,-46.1) 10(0.675,-37.9) 11(0.925,-46.1) 12(1.175,-37.9) 13(1.425,-46.1) 14(1.675,-37.9) 15(1.925,-46.1) 16(2.175,-37.9) 17(2.425,-46.1) 18(2.675,-37.9) 19(2.925,-46.1) 20(3.175,-37.9) 21(3.425,-46.1) 22(3.675,-37.9) 23(3.925,-46.1) 24(4.175,-37.9) 25(4.425,-46.1) 26(4.675,-37.9) 27(4.925,-46.1) 28(5.175,-37.9) 29(5.425,-46.1) 30(5.675,-37.9) 31(5.925,-46.1) 32(6.175,-37.9) 33(6.425,-46.1) 34(6.675,-37.9) 35(6.925,-46.1) 36(7.175,-37.9) 37(7.425,-46.1) 38(7.675,-37.9) 39(7.925,-46.1) 40(8.175,-37.9) 41(8.425,-46.1) 42(8.675,-37.9) 43(8.925,-46.1) 44(9.175,-37.9) 45(9.425,-46.1) 46(9.675,-37.9) 47(9.925,-46.1) 48(10.175,-37.9) 49(10.425,-46.1) 50(10.675,-37.9) 51(10.925,-46.1) 52(11.175,-37.9) 53(11.425,-46.1) 54(11.675,-37.9) 55(11.925,-46.1) 56(12.175,-37.9) 57(12.425,-46.1) 58(12.675,-37.9) 59(12.925,-46.1) 60(13.175,-37.9) 61(13.425,-46.1) 62(13.675,-37.9) 63(13.925,-46.1) 64(14.175,-37.9) 65(14.425,-46.1) 66(14.675,-37.9) 67(14.925,-46.1) 68(15.175,-37.9) 69(15.425,-46.1) 70(15.675,-37.9) 71(15.925,-46.1) 72(16.175,-37.9) 73(16.425,-46.1) 74(16.675,-37.9) 75(16.925,-46.1) 76(17.175,-37.9) 77(17.425,-46.1) 78(17.675,-37.9) 79(17.925,-46.1) 80(18.175,-37.9) 81(18.425,-46.1) 82(18.675,-37.9) 83(18.925,-46.1) 84(19.175,-37.9) 85(19.425,-46.1) 86(19.675,-37.9) 87(19.925,-46.1) 88(20.175,-37.9) 89(20.425,-46.1) 90(20.675,-37.9) 91(20.925,-46.1) 92(21.175,-37.9) 93(21.425,-46.1) 94(21.675,-37.9) 95(21.925,-46.1) 96(22.175,-37.9) 97(22.425,-46.1) 98(22.675,-37.9) 99(22.925,-46.1) 100(23.175,-37.9) 101(23.425,-46.1) 102(23.675,-37.9) 103(23.925,-46.1) 104(24.175,-37.9) 105(24.425,-46.1) 106(24.675,-37.9) 107(24.925,-46.1) 108(25.175,-37.9) 109(25.425,-46.1) 110(25.675,-37.9) 111(25.925,-46.1) 112(26.175,-37.9) 113(26.425,-46.1) 114(26.675,-37.9) 115(26.925,-46.1) 116(27.175,-37.9) 117(27.425,-46.1) 118(27.675,-37.9) 119(27.925,-46.1) 120(28.175,-37.9) 121(28.425,-46.1) 122(28.675,-37.9) 123(28.925,-46.1) 124(29.175,-37.9) 125(29.425,-46.1) 126(29.675,-37.9) 127(29.925,-46.1) 128(30.175,-37.9) 129(30.425,-46.1) 130(30.675,-37.9) 131(30.925,-46.1) 132(31.175,-37.9) 133(31.425,-46.1) 134(31.675,-37.9) 135(31.925,-46.1) 136(32.175,-37.9) 137(32.425,-46.1) 138(32.675,-37.9) 139(32.925,-46.1) 140(33.175,-37.9) 141(33.425,-46.1) 142(33.675,-37.9) 143(33.925,-46.1) 144(34.175,-37.9) 145(36.425,-46.1) 146(36.675,-37.9) 147(36.925,-46.1) 148(37.175,-37.9) 149(37.425,-46.1) 150(37.675,-37.9) 151(37.925,-46.1) 152(38.175,-37.9) 153(38.425,-46.1) 154(38.675,-37.9) 155(38.925,-46.1) 156(39.175,-37.9) 157(39.425,-46.1) 158(39.675,-37.9) 159(39.925,-46.1) 160(40.175,-37.9) 161(40.425,-46.1) 162(40.675,-37.9) 163(40.925,-46.1) 164(41.175,-37.9) 165(41.425,-46.1) 166(41.675,-37.9) 167(41.925,-46.1) 168(42.175,-37.9) 169(42.425,-46.1) 170(42.675,-37.9) 171(42.925,-46.1) 172(43.175,-37.9) 173(43.425,-46.1) 174(43.675,-37.9) 175(43.925,-46.1) 176(44.175,-37.9) 177(44.425,-46.1) 178(44.675,-37.9) 179(44.925,-46.1) 180(45.175,-37.9) 181(45.425,-46.1) 182(45.675,-37.9) 183(45.925,-46.1) 184(46.175,-37.9) 185(46.425,-46.1) 186(46.675,-37.9) 187(46.925,-46.1) 188(47.175,-37.9) 189(47.425,-46.1) 190(47.675,-37.9) 191(47.925,-46.1) 192(48.175,-37.9) 193(48.425,-46.1) 194(48.675,-37.9) 195(48.925,-46.1) 196(49.175,-37.9) 197(49.425,-46.1) 198(49.675,-37.9) 199(49.925,-46.1) 200(50.175,-37.9) 201(50.425,-46.1) 202(50.675,-37.9) 203(50.925,-46.1) 204(51.175,-37.9) 205(51.425,-46.1) 206(51.675,-37.9) 207(51.925,-46.1) 208(52.175,-37.9) 209(52.425,-46.1) 210(52.675,-37.9) 211(52.925,-46.1) 212(53.175,-37.9) 213(53.425,-46.1) 214(53.675,-37.9) 215(53.925,-46.1) 216(54.175,-37.9) 217(54.425,-46.1) 218(54.675,-37.9) 219(54.925,-46.1) 220(55.175,-37.9) 221(55.425,-46.1) 222(55.675,-37.9) 223(55.925,-46.1) 224(56.175,-37.9) 225(56.425,-46.1) 226(56.675,-37.9) 227(56.925,-46.1) 228(57.175,-37.9) 229(57.425,-46.1) 230(57.675,-37.9) 231(57.925,-46.1) 232(58.175,-37.9) 233(58.425,-46.1) 234(58.675,-37.9) 235(58.925,-46.1) 236(59.175,-37.9) 237(59.425,-46.1) 238(59.675,-37.9) 239(59.925,-46.1) 240(60.175,-37.9) 241(60.425,-46.1) 242(60.675,-37.9) 243(60.925,-46.1) 244(61.175,-37.9) 245(61.425,-46.1) 246(61.675,-37.9) 247(61.925,-46.1) 248(62.175,-37.9) 249(62.425,-46.1) 250(62.675,-37.9) 251(62.925,-46.1) 252(63.175,-37.9) 253(63.425,-46.1) 254(63.675,-37.9) 255(63.925,-46.1) 256(64.175,-37.9) 257(64.425,-46.1) 258(64.675,-37.9) 259(64.925,-46.1) 260(65.175,-37.9)
  rect 4.5x4.6 smd paste-0.05: 261(65.6,-30) 262(-2,-30)
  round 0 hole 1.6 unplated: M(-2.6,-42)
  round 0 hole 1.1 unplated: M(66.2,-42)
Top Overlay:
  lines w0.1: -4.954,-28.6 -4.954,-36 -5.5,-36.05 ; -4.878,-28.6 ccw(c-4.878,-28.45) -4.728,-28.45 -4.728,-27.667 ccw(c-4.878,-27.667) -4.878,-27.517 -5.127,-27.517 -5.127,-26.028 -4.978,-26.028 -4.978,-24.813 cw(c-4.778,-24.813) -4.778,-24.613 -3.871,-24.613 -3.871,-24.61 -3.371,-24.61 -3.371,-28.128 -2.5,-31.166 -2.5,-36.05 -2.15,-37.15 -1.65,-37.15 ; 65.85,-37.15 66.1,-36.05 ; -5.5,-36.813 ccw(c-5,-36.813) -5.43,-37.068 ; -5.5,-36.813 ccw(c-5,-36.813) -5.43,-37.068 ; -5.5,-36.813 -5.5,-36.05 ; -5.5,-36.813 -5.5,-36.05 ; -5.43,-37.068 -4.77,-38.182 ; -5.43,-37.068 -4.77,-38.182 ; -4.77,-38.182 cw(c-5.2,-38.437) -4.7,-38.437 ; -4.77,-38.182 cw(c-5.2,-38.437) -4.7,-38.437 ; -4.7,-47 -1.95,-47 -4.7,-47 ; -4.7,-47 -4.7,-38.437 ; -4.7,-47 -4.7,-38.437 ; 66.1,-36.05 66.1,-30.318 ; 66.1,-36.05 66.1,-30.318 ; 66.1,-30.318 66.98,-27.318 66.98,-24.595 67.59,-24.595 ccw(c67.63,-24.45) 67.63,-24.6 68.35,-24.6 cw(c68.35,-24.8) 68.55,-24.8 68.55,-26 68.736,-26 68.736,-27.5 68.5,-27.5 ccw(c68.5,-27.7) 68.3,-27.7 68.3,-28.3 ccw(c68.5,-28.3) 68.5,-28.5 68.545,-28.5 68.545,-36 69.1,-36.05 ; 68.3,-47 65.3,-47 68.3,-47 ; 68.3,-47 68.3,-38.437 ; 68.3,-47 68.3,-38.437 ; 68.3,-38.437 cw(c68.8,-38.437) 68.37,-38.182 ; 68.3,-38.437 cw(c68.8,-38.437) 68.37,-38.182 ; 68.37,-38.182 69.03,-37.068 ; 68.37,-38.182 69.03,-37.068 ; 69.03,-37.068 ccw(c68.6,-36.813) 69.1,-36.813 ; 69.03,-37.068 ccw(c68.6,-36.813) 69.1,-36.813 ; 69.1,-36.813 69.1,-36.05 ; 69.1,-36.813 69.1,-36.05
Mechanical 3:
  circle w0.1: c63.6,0 r1.375
  circle w0.1: c39.413,-30.002 r1.6
  circle w0.1: c39.413,-15.098 r1.6
  circle w0.1: c5.987,-15.098 r1.6
  circle w0.1: c5.987,-30.002 r1.6
  circle w0.1: c0,0 r1.375
  lines w0.1: -1.9,0 0,0 ; 0,-1.9 0,0 ; 0,1.9 0,0 ; 1.9,0 0,0 ; 4.094,-29.997 5.994,-29.997 ; 4.094,-15.088 5.994,-15.088 ; 5.994,-31.897 5.994,-29.997 ; 5.994,-28.097 5.994,-29.997 ; 5.994,-16.988 5.994,-15.088 ; 5.994,-13.188 5.994,-15.088 ; 7.894,-29.997 5.994,-29.997 ; 7.894,-15.088 5.994,-15.088 ; 37.521,-29.997 39.421,-29.997 ; 37.521,-15.113 39.421,-15.113 ; 39.421,-31.897 39.421,-29.997 ; 39.421,-28.097 39.421,-29.997 ; 39.421,-17.013 39.421,-15.113 ; 39.421,-13.213 39.421,-15.113 ; 41.321,-29.997 39.421,-29.997 ; 41.321,-15.113 39.421,-15.113 ; 61.702,0 63.602,0 ; 63.602,-1.9 63.602,0 ; 63.602,1.9 63.602,0 ; 65.502,0 63.602,0
  text "its real position may differ" at 21.15,-1.2 h0.76
  text "module mounting holes placement taken from 3D models" at 12.125,-0.125 h0.76
3D body "CONN-SMD_AS0A821-H2SB-7H.stp": height 5.2, standoff -0.4, extent -4.851,-46.75 68.45,-21.05